# Altium footprint library Project_Footprints.PcbLib: 2 footprints
Each footprint in its own frame and in the unit in brackets; x right, y up, seen from the top. Pads: shape width x height; smd on the part's side, far side on the other; paste and mask are expansions set on the pad; w line width, h text height; cw(c..) or ccw(c..) is an arc to the next point about the centre after c.
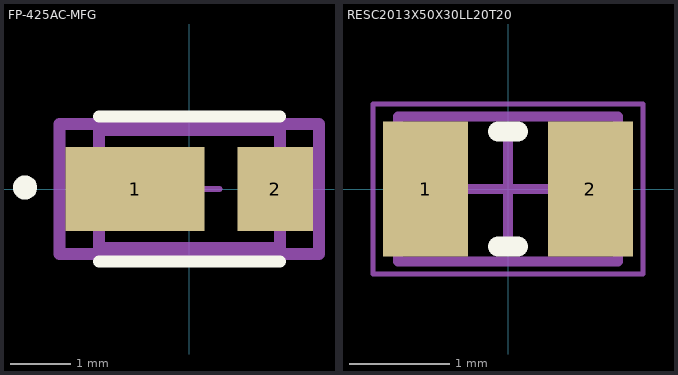
[diagram p0: the footprints below, top view; thin cyan lines are the x and y axes]

## FP-425AC-MFG [mm]
pads (2):
  rect 2.3x1.4 smd paste+0 mask+0: 1(-0.9,0)
  rect 1.25x1.4 smd paste+0 mask+0: 2(1.425,0)
Top Overlay:
  circle w0.2: c-2.725,0.025 r0.1
  lines w0.2: -1.5,-1.2 1.5,-1.2 ; -1.5,1.2 1.5,1.2
Top 3D Body:
  lines w0.2: -1.5,-0.975 -1.5,0.975 1.5,0.975 1.5,-0.975 -1.5,-0.975
Top Courtyard:
  lines w0.2: -2.15,-1.075 -2.15,1.075 2.15,1.075 2.15,-1.075 -2.15,-1.075
Top Assembly:
  lines w0.2: -2.15,-1.075 -2.15,1.075 2.15,1.075 2.15,-1.075 -2.15,-1.075
  text ".Designator" at -0.381,1.585 h1
Top Component Center:
  lines w0.1: -0.5,0 0.5,0 ; 0,-0.5 0,0.5
3D body "Diode_ON_Semiconductor_S110FP_eec.STEP": height 0.25, standoff 0, extent -2.15,-1.075 2.15,1.075

## RESC2013X50X30LL20T20 [mm] "Chip Resistor, 2-Leads, Body 2.00x1.25mm, IPC High Density"
height 0.5
pads (2):
  rect 0.85x1.35 smd: 1(-0.825,0) 2(0.825,0)
Top Overlay:
  lines w0.2: -0.1,-0.575 0.1,-0.575 ; -0.1,0.575 0.1,0.575
Mechanical 13:
  lines w0.1: -1.1,-0.725 1.1,-0.725 1.1,0.725 -1.1,0.725 -1.1,-0.725
Mechanical 15:
  lines w0.05: -1.35,-0.85 1.35,-0.85 1.35,0.85 -1.35,0.85 -1.35,-0.85
  lines w0.1: -0.5,0 0.5,0 ; 0,-0.5 0,0.5
3D body: height 0.5, standoff 0, extent 0.8,-0.725 1.1,0.725
3D body: height 0.5, standoff 0, extent -1.1,-0.725 -0.8,0.725
3D body: height 0.5, standoff 0, extent -0.8,-0.725 0.8,0.725